# Altium schematic symbol library Centralize.SchLib: 1081 symbols (part 4 of 26)
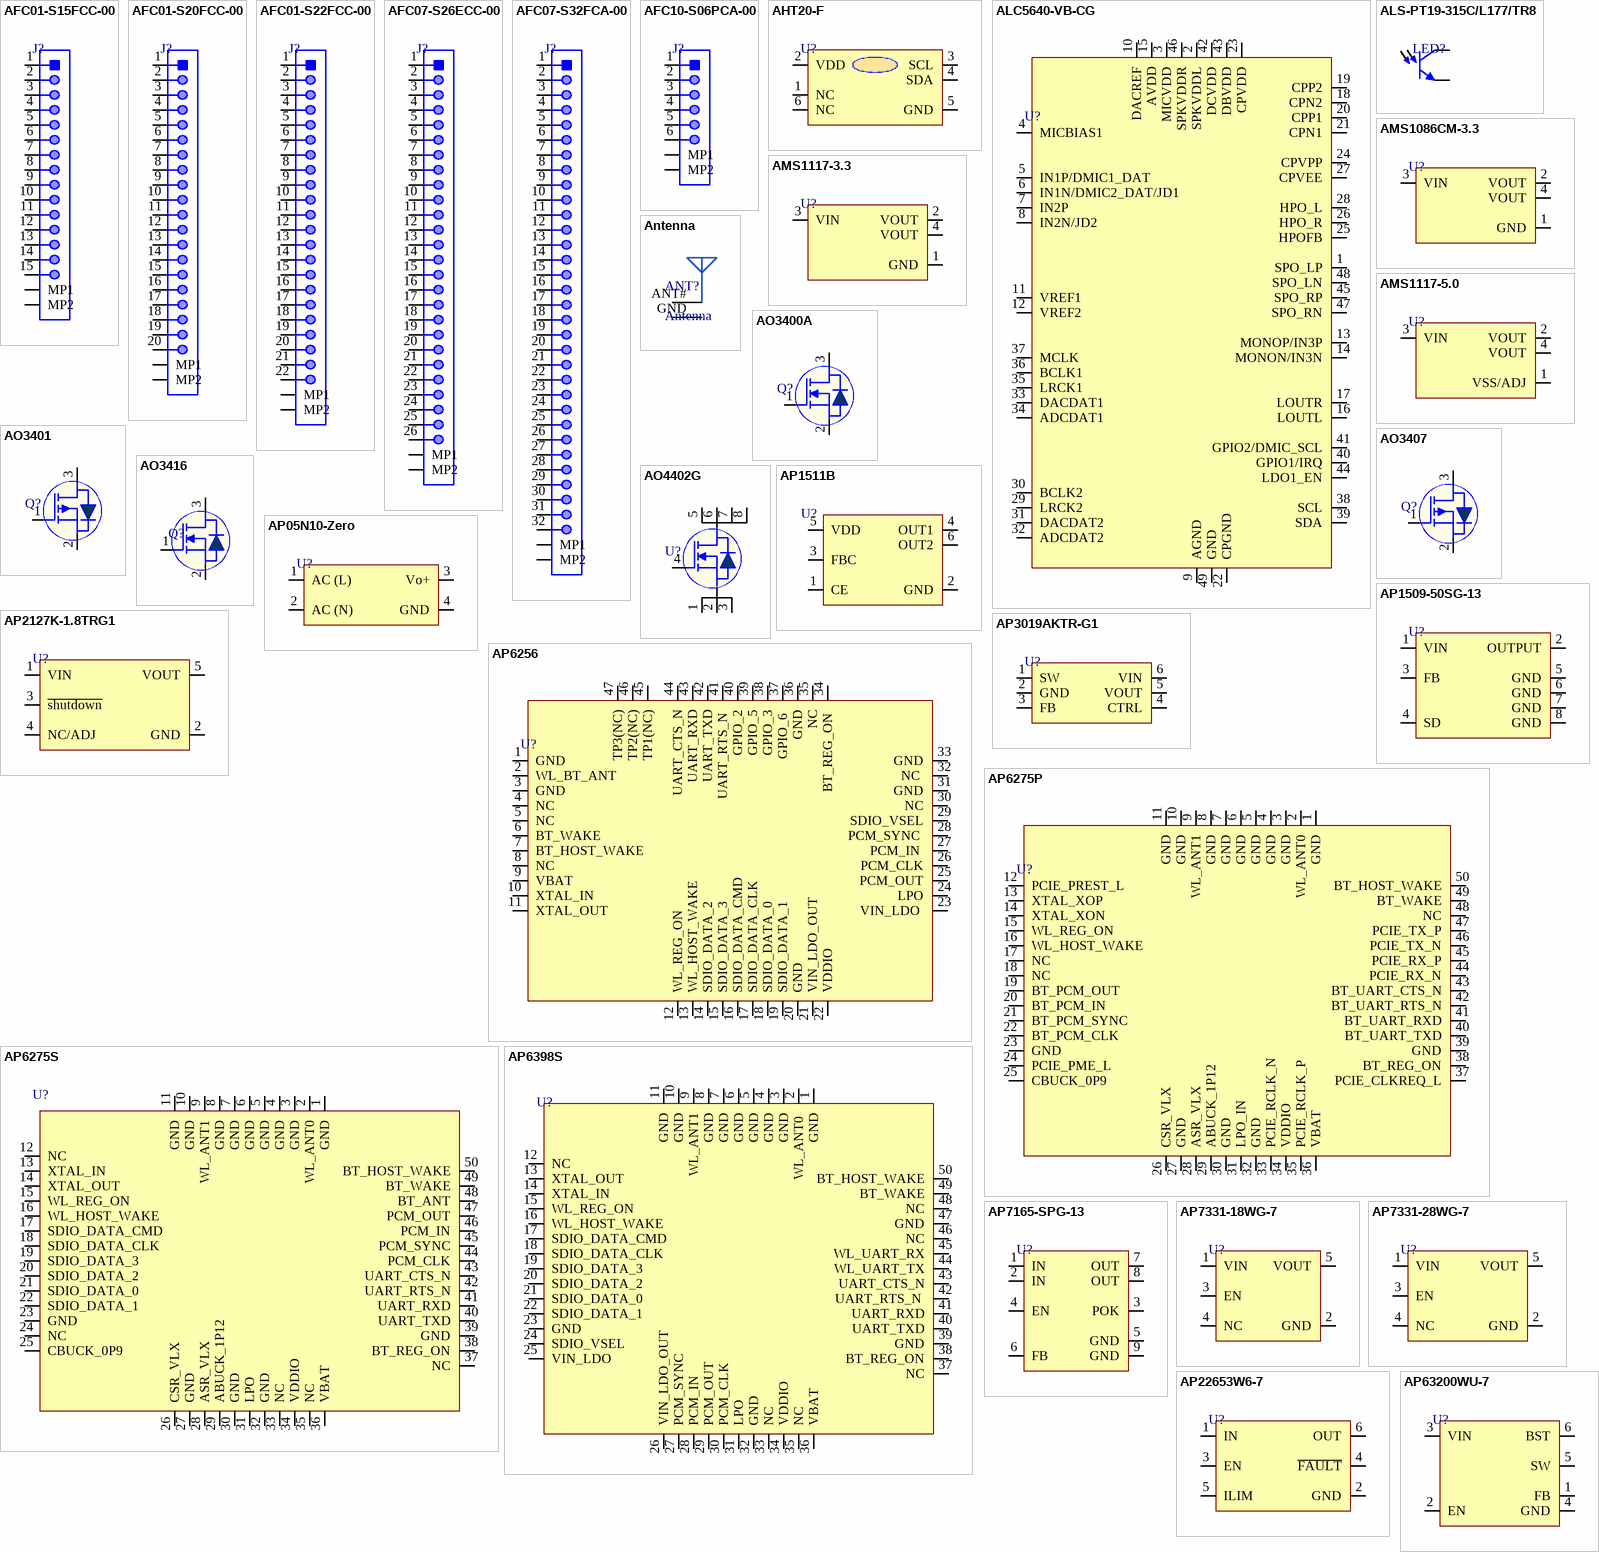
[diagram p50: symbols AFC01-S15FCC-00 to AP63200WU-7]

## AO3401
designator Q?
Trans Mosfet P-ch 30V 4A 3-PIN SOT-23 T/r; Manufacturer: Alpha & Omega Semiconductor; Manufacturer Part Number: AO3401A; Rds On Max: 44mR; Input Capacitance: 1.2nF; Max Power Dissipation: 1.4W; Number of Elements: 1; Supplier 1: Arrow Electronics; RoHS: Yes; Category: MOSFETs; Mount: Surface Mount; Case/Package: TO-236-3; Number of Pins: 3; Min Operating Temperature: -55°C; Max Operating Temperature: 150°C; Packaging: Tape and Reel; Drain to Source Voltage (Vdss): 30V; Continuous Drain Current (ID): 4A; Power Dissipation: 1.4W; Series: -; Radiation Hardening: No; RoHS Compliant: Yes; Lead Free: Lead Free; ComponentLink1URL: https://datasheet.ciiva.com/940/ao3401a-940720.pdf?src-supplier=Digi-Key; ComponentLink1Description: https://datasheet.ciiva.com/940/ao3401a-940720.pdf?src-supplier=Digi-Key; ComponentLink2URL: https://datasheet.ciiva.com/26927/getdatasheetpartid-79048-26927888.pdf?src-supplier=Verical; ComponentLink2Description: https://datasheet.ciiva.com/26927/getdatasheetpartid-79048-26927888.pdf?src-supplier=Verical; Supplier Part Number 1: AO3401A; LCSC Part Number: C181091; Item Type: Mosfet
footprint SOT-23 (TRANS NPN 40V 0.6A SOT23)
pins: 1 G, 2 S, 3 D

## AO3407
designator Q?
30V 4.1A 60mΩ@10V,4.1A 350mW 3V@250uA P Channel SOT-23 MOSFETs ROHS; Manufacturer: Guangdong Hottech; Manufacturer Part Number: AO3407; Item Type: Mosfet; Package: SOT-23; LCSC Part Number: C181093; ComponentLink1Description: LCSC; ComponentLink1URL: https://www.lcsc.com/product-detail/MOSFETs_Guangdong-Hottech-AO3407_C181093.html
footprint SOT-23 (TRANS NPN 40V 0.6A SOT23)
pins: 1 G, 2 S, 3 D

## AO3416
designator Q?
SOT-23 MOSFETs ROHS; Manufacturer Part Number: AO3416; Manufacturer: TECH PUBLIC; Item Type: Mosfet; Package: SOT-23; LCSC Part Number: C5123927; ComponentLink1Description: LCSC; ComponentLink1URL: https://www.lcsc.com/product-detail/MOSFETs_TECH-PUBLIC-AO3416_C5123927.html
footprint Sot-23 (TRANS NPN 40V 0.6A SOT23)
pins: 1 G, 2 S, 3 D

## AO4402G
designator U?
Mosfet N-ch 20V 20A 8SOIC; Manufacturer: Alpha & Omega Semiconductor; Manufacturer Part Number: AO4402G; Supplier: Digi-Key; Supplier Part Number: 785-AO4402GTR-ND; RoHS: No; Category: Transistors; Pricing: 3000=0.47628 (USD); LCSC Part Number: C2931062; Item Type: Mosfet; ComponentLink1Description: LCSC; ComponentLink1URL: https://www.lcsc.com/product-detail/MOSFETs_Alpha-Omega-Semicon-AO4402G_C2931062.html
footprint SOIC-8
pins: 1 S, 2 S, 3 S, 4 G, 5 D, 6 D, 7 D, 8 D

## AP05N10-Zero
designator U?
5V 85VAC~265VAC 2000mA 100V~370V 10W AC/DC-DC 80% Plugin Power Modules ROHS; Manufacturer: HIECUBE; Manufacturer Part Number: AP05N10-Zero; Package: Plugin; LCSC Part Number: C355011; Item Type: Power Module; ComponentLink1Description: LCSC; ComponentLink1URL: https://www.lcsc.com/product-detail/Power-Modules_HIECUBE-AP05N10-Zero_C355011.html
footprint AP05N10-Zero
pins: 1 AC (L), 2 AC (N), 3 Vo+, 4 GND

## AP1509-50SG-13
designator U?
IC REG BUCK 5V 2A 8SOP; Manufacturer: Diodes; Manufacturer Part Number: AP1509-50SG-13; Number of Outputs: 1; Min Input Voltage: 4.5V; Max Supply Voltage: 22V; Efficiency: 83%; Switching Frequency: 150kHz; Synchronous Rectifier: No; Operating Supply Current: 5mA; Output Type: Fixed; Output Configuration: Positive; Frequency: 173kHz; Supplier 1: Rs; RoHS: Yes; Category: Voltage Regulators - Switching; Stock 1: 2230; Pricing 1: 25=1.20600, 125=0.91800, 625=0.81800, 1250=0.63800 (GBP); Mounting Technology: Surface Mount; Case/Package: SOP; Pins: 8; Weight: 0.030018oz; Contact Plating: Tin,Matte; Min Operating Temperature: -20°C; Max Operating Temperature: 85°C; Packaging: Tape and Reel; Output Voltage: 5V; Max Output current: 2A; Package Quantity: 2500; Output Current: 2A; Min Supply Voltage: 4.5V; Nominal Output Voltage: 5V; Min Output Voltage: 5V; Max Output Voltage: 5V; Operating Supply Voltage: 22V; Series: -; Length: 4.95mm; Width: 3.95mm; Height: 1.5mm; Reach SVHC Compliant: Yes; Lead Free: Lead Free; RoHS Compliant: Yes; ComponentLink1URL: https://datasheet.ciiva.com/1161/608784-1161660.pdf?src-supplier=Element14; ComponentLink1Description: https://datasheet.ciiva.com/1161/608784-1161660.pdf?src-supplier=Element14; Supplier Part Number 1: 7512923P; LCSC Part Number: C9984; Item Type: IC
footprint SOP-8
pins: 1 VIN, 2 OUTPUT, 3 FB, 4 SD, 5 GND, 6 GND, 7 GND, 8 GND

## AP1511B
designator U?
SOT-26 Motor Driver ICs ROHS; Manufacturer: UMW(Youtai Semiconductor Co., Ltd.); Manufacturer Part Number: AP1511B; Operating voltage: 2.5-5V; Item Type: IC; Package: SOT-26; ComponentLink1Description: LCSC; ComponentLink1URL: https://lcsc.com/product-detail/Motor-Driver-ICs_UMW-Youtai-Semiconductor-Co-Ltd-AP1511B_C347457.html; LCSC Part Number: C347457
footprint SOT-23-6
pins: 1 CE, 2 GND, 3 FBC, 4 OUT1, 5 VDD, 6 OUT2

## AP2127K-1.8TRG1
designator U?
IC REG LDO 1.8V 0.3A SOT23-5; Manufacturer: Diodes; Manufacturer Part Number: AP2127K-1.8TRG1; Dropout Voltage: 600mV; Number of Outputs: 1; Min Input Voltage: 2.5V; Max Input Voltage: 6V; Output Current: 300mA; Polarity: Positive; Quiescent Current: 90uA; Reference Voltage: 800mV; Accuracy: 2%; Power Supply Rejection Ratio (PSRR): 68dB; Max Output Current: 400mA; Output Type: Fixed; Supplier 1: Digi-Key; RoHS: Yes; Category: Voltage Regulators - Linear; Stock 1: 112006; Pricing 1: 1=0.39000, 10=0.29400, 25=0.26480, 100=0.18290, 250=0.15400, 500=0.12512, 1000=0.09625 (USD); Mount: Surface Mount; Case/Package: SOT-23-5; Number of Pins: 5; Weight: 0.001058oz; Min Operating Temperature: -40°C; Max Operating Temperature: 85°C; Package Quantity: 3000; Packaging: Tape and Reel; Output Voltage: 1.8V; Number of Regulators: 1; Length: 3.1mm; Width: 1.7mm; Height: 1.3mm; Lead Free: Lead Free; RoHS Compliant: Yes; ComponentLink1URL: https://datasheet.ciiva.com/30016/ap2127-30016757.pdf?src-supplier=Avnet; ComponentLink1Description: https://datasheet.ciiva.com/30016/ap2127-30016757.pdf?src-supplier=Avnet; ComponentLink2URL: https://datasheet.ciiva.com/29569/ap2127-29569925.pdf?src-supplier=Digi-Key; ComponentLink2Description: https://datasheet.ciiva.com/29569/ap2127-29569925.pdf?src-supplier=Digi-Key; Supplier Part Number 1: AP2127K-1.8TRG1DICT-ND; Item Type: IC
footprint SOT-23-5
pins: 1 VIN, 2 GND, 3 ~{shutdown}, 4 NC/ADJ, 5 VOUT

## AP3019AKTR-G1
designator U?
IC LED DRVR RGLTR PWM SOT23-6; Manufacturer: Diodes; Manufacturer Part Number: AP3019AKTR-G1; Number of Outputs: 1; Frequency: 1.2MHz; Max Supply Voltage: 16V; Output Current per Channel: 550mA; Max Supply Current: 3.2mA; Output Current: 150mA; Min Input Voltage: 2.5V; Max Output Voltage: 38V; Topology: Boost; Operating Frequency: 1.2 MHz; Supplier 1: Future Electronics; RoHS: Yes; Category: LED Drivers; Stock 1: 6000; Pricing 1: 3000=0.116, 9000=0.113, 15000=0.112, 45000=0.109, 75000=0.106 (USD); Mounting Technology: Surface Mount; Case/Package: SOT-23-6; Pins: 6; Weight: 0.000529oz; Min Operating Temperature: -40°C; Max Operating Temperature: 85°C; Packaging: Tape and Reel; Series: -; Package Quantity: 3000; Number of Channels: 1; Switching Frequency: 1.2MHz; Dimming: PWM; RoHS Compliant: Yes; ComponentLink1URL: https://datasheet.ciiva.com/29602/ap3019a-29602771.pdf?src-supplier=Digi-Key; ComponentLink1Description: https://datasheet.ciiva.com/29602/ap3019a-29602771.pdf?src-supplier=Digi-Key; Supplier Part Number 1: 8048337; LCSC Part Number: C44956; Item Type: IC
footprint SOT-23-6
pins: 1 SW, 2 GND, 3 FB, 4 CTRL, 5 VOUT, 6 VIN

## AP6256
designator U?
802.11ac/a/b/g/n WiFi Combo Sip Module (WiFi 5), 1T1R; Manufacturer: SparkLan; Manufacturer Part Number: AP6256; Item Type: IC; Footprint: Custom; ComponentLink1Description: Sparklan; ComponentLink1URL: https://www.sparklan.com/product/ap6256-broadcom-bcm43435-sip-module/
footprint AP6256_
pins: 1 GND, 2 WL_BT_ANT, 3 GND, 4 NC, 5 NC, 6 BT_WAKE , 7 BT_HOST_WAKE, 8 NC, 9 VBAT, 10 XTAL_IN , 11 XTAL_OUT, 12 WL_REG_ON, 13 WL_HOST_WAKE, 14 SDIO_DATA_2, 15 SDIO_DATA_3, 16 SDIO_DATA_CMD, 17 SDIO_DATA_CLK, 18 SDIO_DATA_0, 19 SDIO_DATA_1, 20 GND, 21 VIN_LDO_OUT, 22 VDDIO, 23 VIN_LDO , 24 LPO, 25 PCM_OUT, 26 PCM_CLK, 27 PCM_IN , 28 PCM_SYNC , 29 SDIO_VSEL, 30 NC, 31 GND, 32 NC , 33 GND, 34 BT_REG_ON , 35 NC, 36 GND, 37 GPIO_6 , 38 GPIO_3, 39 GPIO_5, 40 GPIO_2, 41 UART_RTS_N , 42 UART_TXD, 43 UART_RXD, 44 UART_CTS_N, 45 TP1(NC), 46 TP2(NC), 47 TP3(NC)

## AP6275P
designator U?
-90dBm 16dBm 2.4GHz - WiFi Modules ROHS; Manufacturer: AMPAK Tech; Manufacturer Part Number: AP6275P; Item Type: Module; Package: Custom; LCSC Part Number: C2984107; ComponentLink1Description: LCSC; ComponentLink1URL: https://www.lcsc.com/product-detail/WiFi-Modules_AMPAK-Tech-AP6275P_C2984107.html
footprint AP6275P_
pins: 1 GND, 2 WL_ANT0, 3 GND, 4 GND, 5 GND, 6 GND, 7 GND, 8 GND, 9 WL_ANT1, 10 GND, 11 GND, 12 PCIE_PREST_L, 13 XTAL_XOP, 14 XTAL_XON, 15 WL_REG_ON, 16 WL_HOST_WAKE, 17 NC, 18 NC, 19 BT_PCM_OUT, 20 BT_PCM_IN, 21 BT_PCM_SYNC, 22 BT_PCM_CLK, 23 GND, 24 PCIE_PME_L, 25 CBUCK_0P9, 26 CSR_VLX, 27 GND, 28 ASR_VLX, 29 ABUCK_1P12, 30 GND, 31 LPO_IN, 32 GND, 33 PCIE_RCLK_N, 34 VDDIO, 35 PCIE_RCLK_P, 36 VBAT, 37 PCIE_CLKREQ_L, 38 BT_REG_ON, 39 GND, 40 BT_UART_TXD, 41 BT_UART_RXD, 42 BT_UART_RTS_N, 43 BT_UART_CTS_N, 44 PCIE_RX_N, 45 PCIE_RX_P, 46 PCIE_TX_N, 47 PCIE_TX_P, 48 NC, 49 BT_WAKE, 50 BT_HOST_WAKE

## AP6275S
designator U?
-86dBm 14dBm 2.4GHz - WiFi Modules ROHS; Manufacturer: AMPAK Tech; Manufacturer Part Number: AP6275S; Item Type: Module; Package: Custom; LCSC Part Number: C2918717; ComponentLink1Description: LCSC; ComponentLink1URL: https://www.lcsc.com/product-detail/WiFi-Modules_AMPAK-Tech-AP6275S_C2918717.html
footprint AP6275S_
pins: 1 GND, 2 WL_ANT0, 3 GND, 4 GND, 5 GND, 6 GND, 7 GND, 8 GND, 9 WL_ANT1, 10 GND, 11 GND, 12 NC, 13 XTAL_IN, 14 XTAL_OUT, 15 WL_REG_ON, 16 WL_HOST_WAKE, 17 SDIO_DATA_CMD, 18 SDIO_DATA_CLK, 19 SDIO_DATA_3, 20 SDIO_DATA_2, 21 SDIO_DATA_0, 22 SDIO_DATA_1, 23 GND, 24 NC, 25 CBUCK_0P9, 26 CSR_VLX, 27 GND, 28 ASR_VLX, 29 ABUCK_1P12, 30 GND, 31 LPO, 32 GND, 33 NC, 34 VDDIO, 35 NC, 36 VBAT, 37 NC, 38 BT_REG_ON, 39 GND, 40 UART_TXD, 41 UART_RXD, 42 UART_RTS_N, 43 UART_CTS_N, 44 PCM_CLK, 45 PCM_SYNC, 46 PCM_IN, 47 PCM_OUT, 48 BT_ANT, 49 BT_WAKE, 50 BT_HOST_WAKE

## AP6398S
designator U?
802.11ac/a/b/g/n 2x2 WiFi with Bluetooth5.0 Combo SIP Module; Manufacturer: SparkLAN; Manufacturer Part Number: AP6398S; Item Type: IC; Footprint: Custom; ComponentLink1Description: Verical; ComponentLink1URL: https://www.verical.com/pd/sparklan-communicationslnc.-combo-wireless-module-ap6398s-7079266?utm_medium=datasheet&utm_source=pdf&utm_content=link&utm_term=AP6398S&utm_campaign=datasheet_coverpage_2017
footprint AP6398S_
pins: 1 GND, 2 WL_ANT0 , 3 GND, 4 GND, 5 GND, 6 GND, 7 GND, 8 GND, 9 WL_ANT1, 10 GND, 11 GND, 12 NC, 13 XTAL_OUT, 14 XTAL_IN, 15 WL_REG_ON , 16 WL_HOST_WAKE, 17 SDIO_DATA_CMD, 18 SDIO_DATA_CLK , 19 SDIO_DATA_3, 20 SDIO_DATA_2, 21 SDIO_DATA_0, 22 SDIO_DATA_1, 23 GND, 24 SDIO_VSEL , 25 VIN_LDO, 26 VIN_LDO_OUT, 27 PCM_SYNC , 28 PCM_IN, 29 PCM_OUT, 30 PCM_CLK , 31 LPO , 32 GND, 33 NC, 34 VDDIO , 35 NC, 36 VBAT , 37 NC, 38 BT_REG_ON, 39 GND, 40 UART_TXD, 41 UART_RXD, 42 UART_RTS_N , 43 UART_CTS_N, 44 WL_UART_TX, 45 WL_UART_RX, 46 NC, 47 GND, 48 NC, 49 BT_WAKE, 50 BT_HOST_WAKE

## AP7165-SPG-13
designator U?
IC REG LINEAR POS ADJ 600MA 8SO; Manufacturer: Diodes; Manufacturer Part Number: AP7165-SPG-13; Output Voltage: 5V; Number of Outputs: 1; Min Input Voltage: 2.2V; Max Input Voltage: 5.5V; Max Power Dissipation: 1.9W; Polarity: Positive; Quiescent Current: 170uA; Accuracy: 2.5%; Output Type: Adjustable; Dropout Voltage: 300mV; Input Bias Current: 125uA; Reference Voltage: 800mV; Power Dissipation: 1.9kW; Power Rating: 4W; Power Supply Rejection Ratio (PSRR): 60dB; Supplier 1: Arrow Electronics; RoHS: Yes; Category: Voltage Regulators - Linear; Stock 1: 5000; Pricing 1: 2500=0.28480 (USD); Mount: Surface Mount; Case/Package: SOIC; Number of Pins: 8; Min Operating Temperature: -40°C; Max Operating Temperature: 85°C; Max Output Current: 600mA; Package Quantity: 2500; Output Current: 600mA; Packaging: Tape and Reel; Number of Regulators: 1; Min Current Limit: 600mA; Series: -; Length: 4.95mm; Width: 3.95mm; Height: 1.5mm; Radiation Hardening: No; Lead Free: Lead Free; RoHS Compliant: Yes; ComponentLink1URL: https://datasheet.ciiva.com/26856/getdatasheetpartid-624973-26856354.pdf?src-supplier=Verical; ComponentLink1Description: https://datasheet.ciiva.com/26856/getdatasheetpartid-624973-26856354.pdf?src-supplier=Verical; ComponentLink2URL: https://datasheet.ciiva.com/8240/ap7165-8240044.pdf?src-supplier=Avnet; ComponentLink2Description: https://datasheet.ciiva.com/8240/ap7165-8240044.pdf?src-supplier=Avnet; Supplier Part Number 1: AP7165-SPG-13; LCSC Part Number: C460364; Item Type: IC
footprint 8-SO-EP_
pins: 1 IN, 2 IN, 3 POK, 4 EN, 5 GND, 6 FB, 7 OUT, 8 OUT, 9 GND

## AP7331-18WG-7
designator U?
IC REG LINEAR 1.8V 300MA SOT25; Manufacturer: Diodes; Manufacturer Part Number: AP7331-18WG-7; Number of Outputs: 1; Min Input Voltage: 2V; Max Input Voltage: 6V; Max Power Dissipation: 640mW; Polarity: Positive; Quiescent Current: 55uA; Accuracy: 2%; Output Type: Fixed; Dropout Voltage: 550mV; Min Current Limit: 400mA; Reference Voltage: 400mV; Power Dissipation: 640W; Power Supply Rejection Ratio (PSRR): 65dB; Supplier 1: Digi-Key; RoHS: Yes; Category: Voltage Regulators - Linear; Stock 1: 2879; Pricing 1: 1=0.48000, 10=0.38700, 25=0.35400, 100=0.26360, 250=0.23884, 500=0.19766, 1000=0.14825 (USD); Mount: Surface Mount; Case/Package: SOT-25; Number of Pins: 5; Contact Plating: Tin,Matte; Min Operating Temperature: -40°C; Max Operating Temperature: 85°C; Max Output Current: 300mA; Output Voltage: 1.8V; Packaging: Tape and Reel; Output Current: 300mA; Package Quantity: 3000; Number of Regulators: 1; Series: AP7331; Length: 3.1mm; Width: 1.7mm; Height: 1.3mm; Radiation Hardening: No; Lead Free: Lead Free; REACH SVHC: No SVHC; RoHS Compliant: Yes; ComponentLink1URL: https://datasheet.ciiva.com/4887/ap7331-84206-4887904.pdf?src-supplier=Mouser; ComponentLink1Description: https://datasheet.ciiva.com/4887/ap7331-84206-4887904.pdf?src-supplier=Mouser; ComponentLink2URL: https://datasheet.ciiva.com/26856/getdatasheetpartid-661842-26856377.pdf?src-supplier=Verical; ComponentLink2Description: https://datasheet.ciiva.com/26856/getdatasheetpartid-661842-26856377.pdf?src-supplier=Verical; ComponentLink3URL: https://datasheet.ciiva.com/26908/ap7331-18wg-7-26908418.pdf?src-supplier=IIIC; ComponentLink3Description: https://datasheet.ciiva.com/26908/ap7331-18wg-7-26908418.pdf?src-supplier=IIIC; Supplier Part Number 1: AP7331-18WG-7DICT-ND; LCSC Part Number: C155293; Item Type: IC
footprint SOT-23-5
pins: 1 VIN, 2 GND, 3 EN, 4 NC, 5 VOUT

## AP7331-28WG-7
designator U?
IC REG LINEAR 2.8V 300MA SOT25; Manufacturer: Diodes; Manufacturer Part Number: AP7331-28WG-7; Number of Outputs: 1; Min Input Voltage: 2V; Max Input Voltage: 6V; Max Power Dissipation: 640mW; Polarity: Positive; Quiescent Current: 75uA; Accuracy: 2%; Output Type: Fixed; Dropout Voltage: 300mV; Operating Supply Current: 65uA; Reference Voltage: 400mV; Min Current Limit: 400mA; Power Supply Rejection Ratio (PSRR): 65dB; Supplier 1: Digi-Key; RoHS: Yes; Category: Voltage Regulators - Linear; Stock 1: 8767; Pricing 1: 1=0.52000, 10=0.41800, 25=0.38280, 100=0.28490, 250=0.25820, 500=0.21370, 1000=0.16027 (USD); Mount: Surface Mount; Case/Package: SOT-25; Number of Pins: 5; Min Operating Temperature: -40°C; Max Operating Temperature: 85°C; Max Output Current: 300mA; Output Voltage: 2.8V; Packaging: Tape and Reel; Package Quantity: 3000; Output Current: 300mA; Number of Regulators: 1; Series: -; Length: 3.1mm; Width: 1.7mm; Height: 1.3mm; Radiation Hardening: No; Lead Free: Lead Free; REACH SVHC: No SVHC; RoHS Compliant: Yes; ComponentLink1URL: https://datasheet.ciiva.com/17365/ap7331-17365896.pdf?src-supplier=Avnet+Europe; ComponentLink1Description: https://datasheet.ciiva.com/17365/ap7331-17365896.pdf?src-supplier=Avnet+Europe; Supplier Part Number 1: AP7331-28WG-7DICT-ND; LCSC Part Number: C460376; Item Type: IC
footprint SOT-23-5
pins: 1 VIN, 2 GND, 3 EN, 4 NC, 5 VOUT

## AP22653W6-7
designator U?
LOAD SWITCH,SOT26,T&R,3K; Manufacturer: Diodes; Manufacturer Part Number: AP22653W6-7; Item Type: IC; Supplier 1: Digi-Key; Stock 1: 884; Pricing 1: 1=0.44, 10=0.377, 25=0.352, 100=0.2817, 250=0.26156, 500=0.2213, 1000=0.17101 (USD); Supplier Part Number 1: 31-AP22653W6-7CT-ND; LCSC Part Number: C2158037
footprint SOT-23-6
pins: 1 IN, 2 GND, 3 EN, 4 ~{FAULT}, 5 ILIM, 6 OUT

## AP63200WU-7
designator U?
IC REG BUCK ADJUSTABLE 2A TSOT26; Manufacturer: Diodes; Manufacturer Part Number: AP63200WU-7; Supplier: Future Electronics; Supplier Part Number: 1108623; RoHS: Yes; Category: Voltage Regulators - Switching; Stock: 70; Pricing: 1=0.425, 15=0.385, 75=0.36, 300=0.345, 1500=0.315 (USD); ComponentLink1URL: https://www.diodes.com/assets/Datasheets/AP63200-AP63201-AP63203-AP63205.pdf?src-supplier=Digi-Key; ComponentLink1Description: https://www.diodes.com/assets/Datasheets/AP63200-AP63201-AP63203-AP63205.pdf?src-supplier=Digi-Key; LCSC Part Number: C2071868; Item Type: IC
footprint TSOT-26-6
pins: 1 FB, 2 EN, 3 VIN, 4 GND, 5 SW, 6 BST

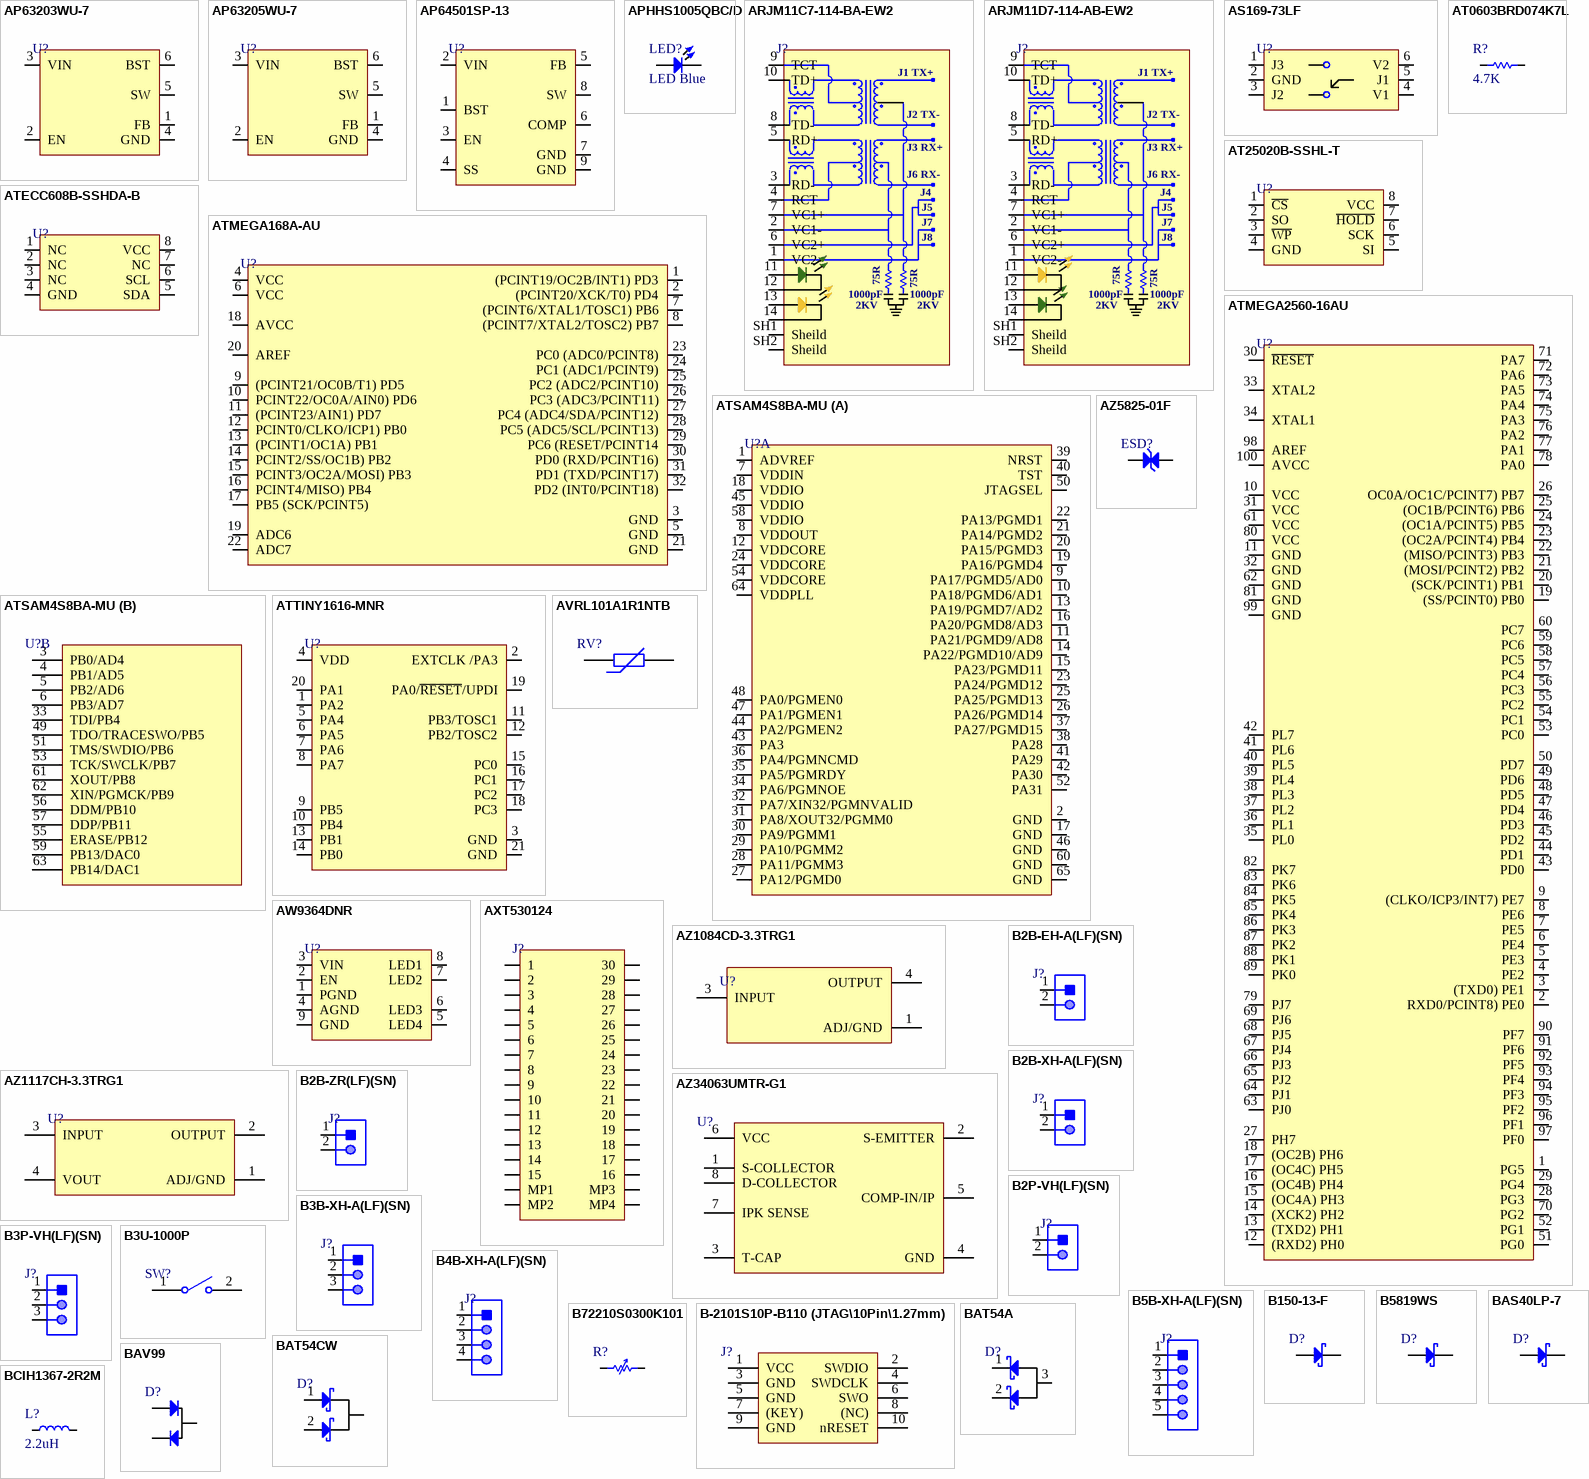
[diagram p4: symbols AP63203WU-7 to BCIH1367-2R2M]

## AP63203WU-7
designator U?
IC REG BUCK 3.3V 2A TSOT26; Manufacturer: Diodes; Manufacturer Part Number: AP63203WU-7; Supplier: Future Electronics; Supplier Part Number: 6109504; RoHS: Yes; Category: Voltage Regulators - Switching; Stock: 3000; Pricing: 3000=0.34, 6000=0.335, 9000=0.33, 12000=0.33, 15000=0.32 (USD); ComponentLink1URL: https://www.diodes.com/assets/Datasheets/AP63200-AP63201-AP63203-AP63205.pdf?src-supplier=Digi-Key; ComponentLink1Description: https://www.diodes.com/assets/Datasheets/AP63200-AP63201-AP63203-AP63205.pdf?src-supplier=Digi-Key; LCSC Part Number: C780769; Item Type: IC
footprint TSOT-23-6
pins: 1 FB, 2 EN, 3 VIN, 4 GND, 5 SW, 6 BST

## AP63205WU-7
designator U?
IC REG BUCK 5V 2A TSOT26; Manufacturer: Diodes; Manufacturer Part Number: AP63205WU-7; Supplier 1: Digi-Key; RoHS: Yes; Category: Voltage Regulators - Switching; Stock 1: 88525; Pricing 1: 1=0.88, 10=0.776, 25=0.7292, 100=0.5952, 250=0.55284, 500=0.4705, 1000=0.3764 (USD); Supplier Part Number 1: AP63205WU-7DICT-ND; LCSC Part Number: C2071056; Item Type: IC
footprint TSOT-23-6
pins: 1 FB, 2 EN, 3 VIN, 4 GND, 5 SW, 6 BST

## AP64501SP-13
designator U?
DCDC CONV HV BUCK SO-8EP; Manufacturer: Diodes; Manufacturer Part Number: AP64501SP-13; Item Type: IC; Supplier 1: Digi-Key; Stock 1: 4418; Pricing 1: 1=2.44, 10=2.191, 25=2.0672, 100=1.7611, 250=1.6536, 500=1.4469, 1000=1.19886 (USD); Supplier Part Number 1: 31-AP64501SP-13CT-ND; LCSC Part Number: C2071517
footprint 8-SO-EP_
pins: 1 BST, 2 VIN, 3 EN, 4 SS, 5 FB, 6 COMP, 7 GND, 8 SW, 9 GND

## APHHS1005QBC/D
designator LED?, comment LED Blue
LED BLUE CLEAR CHIP SMD 0402; Manufacturer: Kingbright; Manufacturer Part Number: APHHS1005QBC/D; Lens Colour: Colorless; Forward Current: 20mA; Forward Voltage: 3.3V; Power Rating: 120mW; Luminous Intensity: 60mcd; Viewing Angle: 120°; Dominant Wavelength: 465nm; Supplier 1: Digi-Key; Stock 1: 57149; Pricing 1: 1=0.58, 10=0.42, 25=0.3432, 100=0.2746, 250=0.23168, 500=0.19734, 1000=0.15444 (USD); Mount: Surface Mount; Case/Package: 0402; Colour: Blue; Case Code (Metric): 1005; Case Code (Imperial): 0402; Min Operating Temperature: -40°C; Max Operating Temperature: 85°C; Package Quantity: 2000; Illumination Colour: Blue; Packaging: Tape and Reel; Lens Style: Clear; Lens Transparency: Clear; Test Current: 20mA; Length: 1mm; Height: 0.6mm; Width: 0.5mm; Lead Free: Lead Free; ComponentLink1URL: http://www.mouser.com/ds/2/216/APHHS1005QBC-D-54846.pdf; ComponentLink1Description: http://www.mouser.com/ds/2/216/APHHS1005QBC-D-54846.pdf; ComponentLink2URL: http://www.kingbrightusa.com/images/catalog/SPEC/APHHS1005QBC-D.pdf; ComponentLink2Description: http://www.kingbrightusa.com/images/catalog/SPEC/APHHS1005QBC-D.pdf; Supplier Part Number 1: 754-1504-1-ND; Item Type: LED
footprint LED-0402
pins: 1, 2

## ARJM11C7-114-BA-EW2
designator J?
Conn RJ-45 F 8 POS 1.27mm Solder RA Thru-Hole 14 Terminal 1 Port Tray; Manufacturer: Abracon; Manufacturer Part Number: ARJM11C7-114-BA-EW2; Connector Type: RJ45; Direction: Up; Number of Ports: 1; Number of Cores per Jack: 4; Shielding: Shielded; Item Type: Ethernet Connector; Supplier 1: Digi-Key; RoHS: Yes; Category: Modular / Ethernet Connectors; Stock 1: 9404; Pricing 1: 1=3.46, 10=3.139, 25=2.9728, 40=2.90375, 100=2.7654, 300=2.4197, 500=2.35058, 1000=2.0049, 2400=1.86663 (USD); Mounting Technology: Through Hole; Color: Green,Yellow; Contact Plating: Gold; Min Operating Temperature: -40°C; Max Operating Temperature: 85°C; Packaging: Tray; Number of Rows: 1; Termination: Solder; Series: ARJM11; RoHS Compliant: Yes; Supplier Part Number 1: 535-14168-ND
footprint ARJM11C7-114-BA-EW2
pins: 1 VC2-, 2 VC1-, 3 RD-, 4 RCT, 5 RD+, 6 VC2+, 7 VC1+, 8 TD-, 9 TCT, 10 TD+, 11 ANODE , 12 CATHODE, 13 ANODE , 14 CATHODE, SH1 Sheild, SH2 Sheild
text: J1 TX+; J2 TX-; J3 RX+; J6 RX-; J4; J5; J7; J8; 75R; 1000pF; 2KV

## ARJM11D7-114-AB-EW2
designator J?
CONN JACK 1PORT 100 BASE-T PCB; Manufacturer: Abracon; Manufacturer Part Number: ARJM11D7-114-AB-EW2; Connector Type: RJ45; Direction: Up; Number of Ports: 1; Number of Cores per Jack: 4; Shielding: Shielded; Item Type: Ethernet Connector; Supplier 1: Mouser; RoHS: Yes; Category: Modular / Ethernet Connectors; Stock 1: 4503; Pricing 1: 1=3.42, 10=3.29, 50=2.88, 100=2.73, 1000=1.98, 10000=1.77 (USD); Mounting Technology: Through Hole; Color: Green,Yellow; Contact Plating: Gold; Min Operating Temperature: -40°C; Max Operating Temperature: 85°C; Packaging: Tray; Number of Rows: 1; Termination: Solder; Series: ARJM11; RoHS Compliant: Yes; ComponentLink1URL: https://abracon.com/Magnetics/ARJM11.pdf?src-supplier=Digi-Key; ComponentLink1Description: https://abracon.com/Magnetics/ARJM11.pdf?src-supplier=Digi-Key; Supplier Part Number 1: 815-RJM11D7114ABEW2
footprint ARJM11D7-114-AB-EW2
pins: 1 VC2-, 2 VC1-, 3 RD-, 4 RCT, 5 RD+, 6 VC2+, 7 VC1+, 8 TD-, 9 TCT, 10 TD+, 11 ANODE , 12 CATHODE, 13 ANODE , 14 CATHODE, SH1 Sheild, SH2 Sheild
text: J1 TX+; J2 TX-; J3 RX+; J6 RX-; J4; J5; J7; J8; 75R; 1000pF; 2KV

## AS169-73LF
designator U?
IC RF SWITCH SPDT 2.5GHZ SOT6; Manufacturer: Skyworks Solutions; Manufacturer Part Number: AS169-73LF; Min Supply Voltage: 3V; Max Supply Voltage: 5V; Impedance: 50R; Insertion Loss: 0.4dB; P1dB: 34dBm; IIP3: 50dBm; Operating Frequency: 300 kHz to 2.5 GHz; Min Frequency: 300kHz; Number of Switches: 1; VSWR: 1.3; Supplier 1: Digi-Key; RoHS: Yes; Category: RF Semiconductors and Devices; Stock 1: 60587; Pricing 1: 1=1.39, 10=1.239, 25=1.1764, 100=0.9664, 250=0.90336, 500=0.7983, 1000=0.63024 (USD); Case/Package: SOT-6; Pins: 6; Min Operating Temperature: -40°C; Max Operating Temperature: 85°C; Frequency: 2.5GHz; Series: -; Packaging: Cut Tape; Package Quantity: 3000; Clock Frequency: 2.5GHz; Termination: SMD/SMT; Throw Configuration: SPDT; Test Frequency: 2.5GHz; Radiation Hardening: No; RoHS Compliant: Yes; Reach SVHC Compliant: Unknown; ComponentLink1URL: https://datasheet.ciiva.com/12080/200105e-32376-12080179.pdf?src-supplier=Mouser; ComponentLink1Description: https://datasheet.ciiva.com/12080/200105e-32376-12080179.pdf?src-supplier=Mouser; ComponentLink2URL: https://datasheet.ciiva.com/1167/200105e-1167200.pdf?src-supplier=Farnell; ComponentLink2Description: https://datasheet.ciiva.com/1167/200105e-1167200.pdf?src-supplier=Farnell; ComponentLink3URL: https://datasheet.ciiva.com/15100/getdatasheetpartid-651219-15100445.pdf?src-supplier=Verical; ComponentLink3Description: https://datasheet.ciiva.com/15100/getdatasheetpartid-651219-15100445.pdf?src-supplier=Verical; Supplier Part Number 1: 863-1002-1-ND; LCSC Part Number: C133314; Item Type: IC
footprint SOT-23-6
pins: 1 J3, 2 GND, 3 J2, 4 V1, 5 J1, 6 V2

## AT0603BRD074K7L
designator R?, comment 4.7K
RES SMD 4.7K OHM 0.1% 1/10W 0603; Manufacturer: Yageo; Manufacturer Part Number: AT0603BRD074K7L; Resistance: 4.7kR; Max Power Dissipation: 100mW; Temperature Coefficient: 25ppm/°C; Item Type: Resistor; Supplier 1: Digi-Key; Stock 1: 7928; Pricing 1: 1=0.56, 10=0.431, 100=0.181, 1000=0.09986, 2500=0.09362 (USD); Case/Package: 0603; Case Code (Metric): 1608; Case Code (Imperial): 0603; Min Operating Temperature: -55°C; Max Operating Temperature: 155°C; Packaging: Tape and Reel; Composition: Thin Film; Number of Terminations: 2; Tolerance: 0.1%; Features: Anti-Sulfur,Automotive AEC-Q200,Moisture Resistant; Length: 0.063inch; Height: 0.022inch; Width: 0.032inch; Supplier Part Number 1: YAG2113CT-ND; LCSC Part Number: C855887
footprint Res-0603
footprint Res-0603
pins: 1, 2

## AT25020B-SSHL-T
designator U?
IC EEPROM 2KBIT SPI 20MHZ 8SOIC; Manufacturer: Microchip; Manufacturer Part Number: AT25020B-SSHL-T; Supplier: Arrow Electronics; Supplier Part Number: AT25020B-SSHL-T; RoHS: Yes; Stock: 11005; Pricing: 1=0.3322, 10=0.329, 25=0.3023, 100=0.2992, 250=0.2962, 500=0.2959, 1000=0.2955, 3000=0.2953, 6000=0.2949 (USD); ComponentLink1URL: https://datasheet.ciiva.com/15212/getdatasheetpartid-362088-15212907.pdf?src-supplier=Verical; ComponentLink1Description: https://datasheet.ciiva.com/15212/getdatasheetpartid-362088-15212907.pdf?src-supplier=Verical; ComponentLink2URL: https://datasheet.ciiva.com/6614/at25010-20-40b-6614732.pdf?src-supplier=Digi-Key; ComponentLink2Description: https://datasheet.ciiva.com/6614/at25010-20-40b-6614732.pdf?src-supplier=Digi-Key; ComponentLink3URL: https://datasheet.ciiva.com/6614/at25010-20-40b-6614733.pdf?src-supplier=Digi-Key; ComponentLink3Description: https://datasheet.ciiva.com/6614/at25010-20-40b-6614733.pdf?src-supplier=Digi-Key; LCSC Part Number: C2061419; Item Type: IC
footprint SOP-8
pins: 1 ~{CS}, 2 SO, 3 ~{WP}, 4 GND, 5 SI, 6 SCK, 7 ~{HOLD}, 8 VCC

## ATECC608B-SSHDA-B
designator U?
IC AUTHENTICATION CHIP 8SOIC; Manufacturer: Microchip; Manufacturer Part Number: ATECC608B-SSHDA-B; Supplier 1: Rs; RoHS: Yes; Category: Interface ICs; Stock 1: 590; Pricing 1: 20=0.758, 50=0.704, 80=0.691 (GBP); Supplier Part Number 1: 2368834P; ComponentLink1Description: LCSC; ComponentLink1URL: https://www.lcsc.com/product-detail/Security-Verification-Encryption-ICs_Microchip-Tech-ATECC608B-SSHDA-B_C5444784.html; LCSC Part Number: C5444784; Item Type: IC
footprint SOIC-8
pins: 1 NC, 2 NC, 3 NC, 4 GND, 5 SDA, 6 SCL, 7 NC, 8 VCC

## ATMEGA168A-AU
designator U?
IC MCU 8BIT 16KB FLASH 32TQFP; Manufacturer: Microchip Tech; Manufacturer Part Number: ATMEGA168A-AU; Package: TQFP-32(7x7); LCSC Part Number: C1522091; Item Type: IC; ComponentLink1URL: https://www.lcsc.com/product-detail/Microcontroller-Units-MCUs-MPUs-SOCs_Microchip-Tech-ATMEGA168A-AU_C1522091.html; ComponentLink1Description: LCSC
footprint 32 TQFP (7x7)
pins: 1 (PCINT19/OC2B/INT1) PD3, 2 (PCINT20/XCK/T0) PD4, 3 GND, 4 VCC, 5 GND, 6 VCC, 7 (PCINT6/XTAL1/TOSC1) PB6, 8 (PCINT7/XTAL2/TOSC2) PB7, 9 (PCINT21/OC0B/T1) PD5, 10 PCINT22/OC0A/AIN0) PD6, 11 (PCINT23/AIN1) PD7, 12 PCINT0/CLKO/ICP1) PB0, 13 (PCINT1/OC1A) PB1, 14 PCINT2/SS/OC1B) PB2, 15 PCINT3/OC2A/MOSI) PB3, 16 PCINT4/MISO) PB4, 17 PB5 (SCK/PCINT5), 18 AVCC, 19 ADC6, 20 AREF, 21 GND, 22 ADC7, 23 PC0 (ADC0/PCINT8), 24 PC1 (ADC1/PCINT9), 25 PC2 (ADC2/PCINT10), 26 PC3 (ADC3/PCINT11), 27 PC4 (ADC4/SDA/PCINT12), 28 PC5 (ADC5/SCL/PCINT13), 29 PC6 (RESET/PCINT14, 30 PD0 (RXD/PCINT16), 31 PD1 (TXD/PCINT17), 32 PD2 (INT0/PCINT18)

## ATMEGA2560-16AU
designator U?
IC MCU 8BIT 256KB FLASH 100TQFP; Manufacturer: Microchip; Manufacturer Part Number: ATMEGA2560-16AU; Number of Terminals/Pins: 100; Package Body Material: Plastic; Core Architecture: AVR; Frequency: 16MHz; Interface: I2C,SPI,UART,USART,EBI/EMI,2-Wire; Number of I/Os: 86; Oscillator Type: Internal; Data Bus Width: 8b; Peripherals: PWM,Brown-out Detect/Reset,POR,WDT; Min Supply Voltage: 4.5V; Max Supply Voltage: 5.5V; Number of PWM Channels: 12; Operating Supply Voltage: 5V; RAM Size: 8KB; Number of Timers/Counters: 6; Number of ADC Channels: 16; Number of SPI Channels: 1; Watchdog Timer: Yes; Access Time: 16us; Time @ Peak Reflow Temperature-Max (s): 40s; Supplier 1: Avnet; RoHS: Yes; Category: Uncategorized; Stock 1: 4; Pricing 1: 1=12.70000 (USD); Mount: Surface Mount; Case/Package: A; Number of Pins: 100; Package Code: TFQFP; Package Shape: Square; Terminal Finish: Tin; Min Operating Temperature: -40°C; Max Operating Temperature: 85°C; Series: AVR® ATmega; Package Quantity: 90; Packaging: Tray; Memory Size: 256KB; Memory Type: FLASH; Density: 256KB; Number of Programmable I/O: 86; Max Frequency: 16MHz; Number of I2C Channels: 1; Termination: SMD/SMT; Terminal Form: Gull Wing; JESD-30 Code: S-PQFP-G100; Surface Mount: Yes; Terminal Position: QUAD; Number of I/O Lines: 86; Moisture Sensitivity Level: 3; Technology: CMOS; Peak Reflow Temperature (Cel): 260°C; Length: 14.1mm; Width: 14.1mm; Height: 1.05mm; Radiation Hardening: No; Reach SVHC Compliant: Yes; Lead Free: Lead Free; RoHS Compliant: Yes; Temperature Grade: INDUSTRIAL; ComponentLink1URL: https://datasheet.ciiva.com/22651/1698622-22651116.pdf?src-supplier=Farnell; ComponentLink1Description: https://datasheet.ciiva.com/22651/1698622-22651116.pdf?src-supplier=Farnell; ComponentLink2URL: https://datasheet.ciiva.com/15122/getdatasheetpartid-134542-15122545.pdf?src-supplier=Verical; ComponentLink2Description: https://datasheet.ciiva.com/15122/getdatasheetpartid-134542-15122545.pdf?src-supplier=Verical; ComponentLink3URL: https://datasheet.ciiva.com/29119/154804-da-01-en-atmega2560-16au-tqfp-100-29119580.pdf?src-supplier=Conrad; ComponentLink3Description: https://datasheet.ciiva.com/29119/154804-da-01-en-atmega2560-16au-tqfp-100-29119580.pdf?src-supplier=Conrad; ComponentLink4URL: https://datasheet.ciiva.com/6640/atmel-2549-8-bit-avr-microcontroller-atmega640-1280-1281-2560-2561-summary-6640293.pdf?src-supplier=Digi-Key; ComponentLink4Description: https://datasheet.ciiva.com/6640/atmel-2549-8-bit-avr-microcontroller-atmega640-1280-1281-2560-2561-summary-6640293.pdf?src-supplier=Digi-Key; ComponentLink5URL: https://datasheet.ciiva.com/1162/33246-1162139.pdf?src-supplier=Farnell; ComponentLink5Description: https://datasheet.ciiva.com/1162/33246-1162139.pdf?src-supplier=Farnell; ComponentLink6URL: https://datasheet.ciiva.com/1157/1817551-1157521.pdf?src-supplier=Element14; ComponentLink6Description: https://datasheet.ciiva.com/1157/1817551-1157521.pdf?src-supplier=Element14; ComponentLink7URL: https://datasheet.ciiva.com/16936/70123980-16936268.pdf?src-supplier=Allied+Electronics; ComponentLink7Description: https://datasheet.ciiva.com/16936/70123980-16936268.pdf?src-supplier=Allied+Electronics; Supplier Part Number 1: 68T2776; LCSC Part Number: C22460; Item Type: IC
footprint TQFP-100(14x14)
pins: 1 PG5, 2 RXD0/PCINT8) PE0, 3 (TXD0) PE1, 4 PE2, 5 PE3, 6 PE4, 7 PE5, 8 PE6, 9 (CLKO/ICP3/INT7) PE7, 10 VCC, 11 GND, 12 (RXD2) PH0, 13 (TXD2) PH1, 14 (XCK2) PH2, 15 (OC4A) PH3, 16 (OC4B) PH4, 17 (OC4C) PH5, 18 (OC2B) PH6, 19 (SS/PCINT0) PB0, 20 (SCK/PCINT1) PB1, 21 (MOSI/PCINT2) PB2, 22 (MISO/PCINT3) PB3, 23 (OC2A/PCINT4) PB4, 24 (OC1A/PCINT5) PB5, 25 (OC1B/PCINT6) PB6, 26 OC0A/OC1C/PCINT7) PB7, 27 PH7, 28 PG3, 29 PG4, 30 ~{RESET}, 31 VCC, 32 GND, 33 XTAL2, 34 XTAL1, 35 PL0, 36 PL1, 37 PL2, 38 PL3, 39 PL4, 40 PL5, 41 PL6, 42 PL7, 43 PD0, 44 PD1, 45 PD2, 46 PD3, 47 PD4, 48 PD5, 49 PD6, 50 PD7, 51 PG0, 52 PG1, 53 PC0, 54 PC1, 55 PC2, 56 PC3, 57 PC4, 58 PC5, 59 PC6, 60 PC7, 61 VCC, 62 GND, 63 PJ0, 64 PJ1, 65 PJ2, 66 PJ3, 67 PJ4, 68 PJ5, 69 PJ6, 70 PG2, 71 PA7, 72 PA6, 73 PA5, 74 PA4, 75 PA3, 76 PA2, 77 PA1, 78 PA0, 79 PJ7, 80 VCC, 81 GND, 82 PK7, 83 PK6, 84 PK5, 85 PK4, 86 PK3, 87 PK2, 88 PK1, 89 PK0, 90 PF7, 91 PF6, 92 PF5, 93 PF4, 94 PF3, 95 PF2, 96 PF1, 97 PF0, 98 AREF, 99 GND, 100 AVCC

## ATSAM4S8BA-MU
designator U?
IC MCU 32BIT 512KB FLASH 64QFN; Manufacturer: Microchip; Manufacturer Part Number: ATSAM4S8BA-MU; Interface: I2C,SPI,USB,IrDA,UART,USART; Peripherals: Brown-out Detect/Reset,POR,PWM,WDT,DMA; Core Architecture: ARM; Frequency: 120MHz; Oscillator Type: Internal; Number of I/Os: 47; Supplier 1: Digi-Key; RoHS: Yes; Category: Microcontrollers; Pricing 1: 1=6.23000, 25=5.66960, 100=5.13000 (USD); Case/Package: QFN; Min Operating Temperature: -40°C; Max Operating Temperature: 85°C; Memory Type: FLASH; Packaging: Tray; Memory Size: 512KB; RoHS Compliant: Yes; ComponentLink1URL: http://www.microchip.com/mymicrochip/filehandler.aspx?ddocname=en590343&src-supplier=Digi-Key; ComponentLink1Description: http://www.microchip.com/mymicrochip/filehandler.aspx?ddocname=en590343&src-supplier=Digi-Key; Supplier Part Number 1: ATSAM4S8BA-MU-ND; LCSC Part Number: C1337875; Item Type: IC
footprint QFN-64-EP(9x9)
part A pins: 1 ADVREF, 2 GND, 7 VDDIN, 8 VDDOUT, 9 PA17/PGMD5/AD0, 10 PA18/PGMD6/AD1, 11 PA21/PGMD9/AD8, 12 VDDCORE, 13 PA19/PGMD7/AD2, 14 PA22/PGMD10/AD9, 15 PA23/PGMD11, 16 PA20/PGMD8/AD3, 17 GND, 18 VDDIO, 19 PA16/PGMD4, 20 PA15/PGMD3, 21 PA14/PGMD2, 22 PA13/PGMD1, 23 PA24/PGMD12, 24 VDDCORE, 25 PA25/PGMD13, 26 PA26/PGMD14, 27 PA12/PGMD0, 28 PA11/PGMM3, 29 PA10/PGMM2, 30 PA9/PGMM1, 31 PA8/XOUT32/PGMM0, 32 PA7/XIN32/PGMNVALID, 34 PA6/PGMNOE, 35 PA5/PGMRDY, 36 PA4/PGMNCMD, 37 PA27/PGMD15, 38 PA28, 39 NRST, 40 TST, 41 PA29, 42 PA30, 43 PA3, 44 PA2/PGMEN2, 45 VDDIO, 46 GND, 47 PA1/PGMEN1, 48 PA0/PGMEN0, 50 JTAGSEL, 52 PA31, 54 VDDCORE, 58 VDDIO, 60 GND, 64 VDDPLL, 65 GND
part B pins: 3 PB0/AD4, 4 PB1/AD5, 5 PB2/AD6, 6 PB3/AD7, 33 TDI/PB4, 49 TDO/TRACESWO/PB5, 51 TMS/SWDIO/PB6, 53 TCK/SWCLK/PB7, 55 ERASE/PB12, 56 DDM/PB10, 57 DDP/PB11, 59 PB13/DAC0, 61 XOUT/PB8, 62 XIN/PGMCK/PB9, 63 PB14/DAC1

## ATTINY1616-MNR
designator U?
IC MCU 8BIT 16KB FLASH 20VQFN; Manufacturer: Microchip Tech; Manufacturer Part Number: ATTINY1616-MNR; Package: QFN-20-EP(3x3); LCSC Part Number: C507118; Item Type: IC; ComponentLink1URL: https://www.lcsc.com/product-detail/Microcontroller-Units-MCUs-MPUs-SOCs_Microchip-Tech-ATTINY1616-MNR_C507118.html; ComponentLink1Description: LCSC
footprint 20-VQFN (3x3)
pins: 1 PA2, 2 EXTCLK /PA3, 3 GND, 4 VDD, 5 PA4, 6 PA5, 7 PA6, 8 PA7, 9 PB5, 10 PB4, 11 PB3/TOSC1, 12 PB2/TOSC2, 13 PB1, 14 PB0, 15 PC0, 16 PC1, 17 PC2, 18 PC3, 19 PA0/~{RESET}/UPDI, 20 PA1, 21 GND

## AVRL101A1R1NTB
designator RV?
Var MLV 10VDC 39V 0402 SMD Automotive T/R; Manufacturer: TDK; Manufacturer Part Number: AVRL101A1R1NTB; Capacitance: 1.1pF; Voltage Rating (DC): 10V; Number of Circuits: 1; ESD Protection: Yes; Voltage Rating (AC): 90V; Item Type: Varistor; Supplier 1: Arrow Electronics; RoHS: Yes; Category: Varistors; Stock 1: 19173; Pricing 1: 1=0.32970, 10=0.24050, 25=0.22400, 100=0.10950, 250=0.10820, 500=0.09010, 1000=0.06020, 3000=0.04830, 6000=0.04780, 15000=0.03940 (USD); Mount: Surface Mount; Case/Package: 0402; Case Code (Imperial): 0402; Case Code (Metric): 1005; Material: Zinc; Contact Plating: Tin; Size Code: 402; Min Operating Temperature: -40°C; Max Operating Temperature: 85°C; Packaging: Tape and Reel; Package Quantity: 10000; Max Voltage Rating (DC): 10V; Termination: SMD/SMT; Varistor Voltage: 39V; Series: AVRL; Length: 1mm; Width: 0.5mm; Depth: 0.5mm; Lead Free: Lead Free; RoHS Compliant: Yes; ComponentLink1URL: https://datasheet.ciiva.com/3024/e9c11-avr-3024276.pdf?src-supplier=Avnet; ComponentLink1Description: https://datasheet.ciiva.com/3024/e9c11-avr-3024276.pdf?src-supplier=Avnet; ComponentLink2URL: https://datasheet.ciiva.com/365/e9c11-avr-365018.pdf?src-supplier=Digi-Key; ComponentLink2Description: https://datasheet.ciiva.com/365/e9c11-avr-365018.pdf?src-supplier=Digi-Key; ComponentLink3URL: https://datasheet.ciiva.com/365/e9c11-avr-365019.pdf?src-supplier=Digi-Key; ComponentLink3Description: https://datasheet.ciiva.com/365/e9c11-avr-365019.pdf?src-supplier=Digi-Key; ComponentLink4URL: https://datasheet.ciiva.com/365/e9c11-avr-365020.pdf?src-supplier=Digi-Key; ComponentLink4Description: https://datasheet.ciiva.com/365/e9c11-avr-365020.pdf?src-supplier=Digi-Key; Supplier Part Number 1: AVRL101A1R1NTB; LCSC Part Number: C92016
footprint Res-0402
pins: 1, 2

## AW9364DNR
designator U?
-40℃~+85℃ DFN-8-EP(2x2) LED Drivers ROHS; Manufacturer: AWINIC; Manufacturer Part Number: AW9364DNR; Item Type: IC; Package: DFN-8-EP(2x2); LCSC Part Number: C401007; ComponentLink1Description: LCSC; ComponentLink1URL: https://www.lcsc.com/product-detail/LED-Drivers_AWINIC-Shanghai-Awinic-Tech-AW9364DNR_C401007.html
footprint DFN-8-EP(2x2)
pins: 1 PGND, 2 EN, 3 VIN, 4 AGND, 5 LED4, 6 LED3, 7 LED2, 8 LED1, 9 GND

## AXT530124
designator J?
CONN SOCKET 30POS SMD GOLD; Manufacturer: Panasonic; Manufacturer Part Number: AXT530124; Number of Positions: 30; Contact Resistance: 90mR; Max Current Rating: 5A; Max Voltage Rating (DC): 60V; Current Rating: 300mA; Insulation Resistance: 1GR; Pitch: 0.4mm; Mated Stacking Heights: 1mm; Item Type: Connector; Supplier 1: Digi-Key; RoHS: Yes; Category: Board to Board Connectors; Stock 1: 14790; Pricing 1: 1=1.43000, 10=1.20900, 25=1.15960, 50=1.13500, 100=1.08570, 250=0.98700, 500=0.88830, 1000=0.78960 (USD); Mount: Surface Mount; Contact Plating: Gold; Contact Material: Copper Alloy; Housing Material: Polymer; Min Operating Temperature: -55°C; Max Operating Temperature: 85°C; Package Quantity: 1; Number of Rows: 2; Packaging: Tape and Reel; Connector Type: Socket; Voltage Rating: 60V; Termination: Solder; Number of Contacts: 30; Max Voltage Rating (AC): 60V; Orientation: Straight; Series: F4S; Length: 8.5mm; Depth: 3mm; Radiation Hardening: No; Lead Free: Lead Free; RoHS Compliant: Yes; ComponentLink1URL: http://components.arrow.com/part/dataview/0323_03238060?src-supplier=Arrow+Europe; ComponentLink1Description: http://components.arrow.com/part/dataview/0323_03238060?src-supplier=Arrow+Europe; ComponentLink2URL: http://www.mouser.com/ds/2/315/f4s-catalog-1075850.pdf?src-supplier=Mouser; ComponentLink2Description: http://www.mouser.com/ds/2/315/f4s-catalog-1075850.pdf?src-supplier=Mouser; ComponentLink3URL: http://components.arrow.com/part/dataview/46992153S8061598N2972?src-supplier=Arrow+Electronics; ComponentLink3Description: http://components.arrow.com/part/dataview/46992153S8061598N2972?src-supplier=Arrow+Electronics; ComponentLink4URL: http://panasonic-denko.co.jp/ac/e_download/control/connector/base-fpc/catalog/con_eng_f4s.pdf?via=ok&src-supplier=Avnet; ComponentLink4Description: http://panasonic-denko.co.jp/ac/e_download/control/connector/base-fpc/catalog/con_eng_f4s.pdf?via=ok&src-supplier=Avnet; ComponentLink5URL: http://www3.panasonic.biz/ac/e_download/control/connector/base-fpc/catalog/con_eng_f4s.pdf?src-supplier=Digi-Key; ComponentLink5Description: http://www3.panasonic.biz/ac/e_download/control/connector/base-fpc/catalog/con_eng_f4s.pdf?src-supplier=Digi-Key; ComponentLink6URL: http://panasonic-denko.co.jp/ac/e_download/control/connector/base-fpc/catalog/con_eng_f4s.pdf?via=ok&src-supplier=Avnet+Asia; ComponentLink6Description: http://panasonic-denko.co.jp/ac/e_download/control/connector/base-fpc/catalog/con_eng_f4s.pdf?via=ok&src-supplier=Avnet+Asia; ComponentLink7URL: https://www.verical.com/server-webapp/html/getDatasheet?partID=80226&src-supplier=Verical; ComponentLink7Description: https://www.verical.com/server-webapp/html/getDatasheet?partID=80226&src-supplier=Verical; ComponentLink8URL: http://www.onlinecomponents.com/datasheet/axt530124.aspx?p=10552986&src-supplier=Onlinecomponents.com; ComponentLink8Description: http://www.onlinecomponents.com/datasheet/axt530124.aspx?p=10552986&src-supplier=Onlinecomponents.com; Supplier Part Number 1: 255-2410-1-ND; LCSC Part Number: C2924271
footprint AXT530124_
pins: 1, 2, 3, 4, 5, 6, 7, 8, 9, 10, 11, 12, 13, 14, 15, 16, 17, 18, 19, 20, 21, 22, 23, 24, 25, 26, 27, 28, 29, 30, MP1, MP2, MP3, MP4

## AZ1084CD-3.3TRG1
designator U?
IC REG LINEAR 3.3V 5A TO252-2; Manufacturer: Diodes; Manufacturer Part Number: AZ1084CD-3.3TRG1; Number of Outputs: 1; Max Input Voltage: 12V; Dropout Voltage: 1.35V; Min Current Limit: 5.5A; Polarity: Positive; Quiescent Current: 5mA; Reference Voltage: 1.262V; Power Supply Rejection Ratio (PSRR): 72dB; Output Type: Fixed; Supplier 1: RSComponents; RoHS: Yes; Category: Voltage Regulators - Linear; Stock 1: 1000; Pricing 1: 100=0.23900, 200=0.22800, 400=0.21600, 800=0.20500 (GBP); Mount: Surface Mount; Case/Package: TO-252-3; Number of Pins: 3; Min Operating Temperature: 0°C; Max Operating Temperature: 125°C; Max Output Current: 5A; Output Voltage: 3.3V; Package Quantity: 2500; Packaging: Tape and Reel; Output Current: 5A; Number of Regulators: 1; Length: 6.73mm; Width: 6.22mm; Height: 2.38mm; RoHS Compliant: Yes; ComponentLink1URL: https://datasheet.ciiva.com/29570/az1084c-29570097.pdf?src-supplier=Digi-Key; ComponentLink1Description: https://datasheet.ciiva.com/29570/az1084c-29570097.pdf?src-supplier=Digi-Key; Supplier Part Number 1: 8287570P; LCSC Part Number: C151391; Item Type: IC
footprint TO-252AA
pins: 1 ADJ/GND, 3 INPUT, 4 OUTPUT

## AZ1117CH-3.3TRG1
designator U?
15V 1.3V @ 800mA Fixed 3.3V SOT-223 Linear Voltage Regulators (LDO) ROHS; Manufacturer: Diodes Incorporated; Manufacturer Part Number: AZ1117CH-3.3TRG1; Item Type: IC; Package: SOT-223; LCSC Part Number: C92102; ComponentLink1Description: LCSC; ComponentLink1URL: https://lcsc.com/product-detail/Linear-Voltage-Regulators-LDO_Diodes-Incorporated-AZ1117CH-3-3TRG1_C92102.html
footprint SOT- 223
pins: 1 ADJ/GND, 2 OUTPUT, 3 INPUT, 4 VOUT

## AZ5825-01F
designator ESD?
DFN1006P ESD Protection Devices ROHS; Manufacturer: TECH PUBLIC; Manufacturer Part Number: AZ5825-01F; Item Type: Diode; ComponentLink1Description: LCSC; ComponentLink1URL: https://lcsc.com/product-detail/ESD-Protection-Devices_TECH-PUBLIC-AZ5825-01F_C2905641.html; Footprint: FN1006P; LCSC Part Number: C2905641
footprint DFN1006-2L_
pins: 1 A, 2 A

## AZ34063UMTR-G1
designator U?
IC REG BUCK BST ADJ 1.5A 8SOIC; Manufacturer: Diodes; Manufacturer Part Number: AZ34063UMTR-G1; Number of Outputs: 1; Output Voltage: 36V; Min Input Voltage: 3V; Min Output Voltage: 1.25V; Switching Frequency: 180kHz; Synchronous Rectifier: No; Operating Supply Current: 4mA; Output Type: Adjustable; Supplier 1: Digi-Key; RoHS: Yes; Category: Power Supply Modules; Stock 1: 13716; Pricing 1: 1=0.51000, 10=0.41500, 25=0.37920, 100=0.28220, 250=0.25576, 500=0.21166, 1000=0.15875 (USD); Mount: Surface Mount; Case/Package: SOIC; Number of Pins: 8; Weight: 0.00261oz; Min Operating Temperature: -40°C; Max Operating Temperature: 85°C; Packaging: Tape and Reel; Max Output Current: 1.5A; Max Input Voltage: 36V; Package Quantity: 4000; Max Output Voltage: 36V; Output Current: 1.5A; Min Supply Voltage: 3V; Operating Supply Voltage: 36V; Length: 5.1mm; Width: 4mm; Height: 1.45mm; Lead Free: Lead Free; RoHS Compliant: Yes; ComponentLink1URL: https://datasheet.ciiva.com/29734/az34063u-29734577.pdf?src-supplier=Digi-Key; ComponentLink1Description: https://datasheet.ciiva.com/29734/az34063u-29734577.pdf?src-supplier=Digi-Key; ComponentLink2URL: https://datasheet.ciiva.com/29734/az34063u-29734583.pdf?src-supplier=Digi-Key; ComponentLink2Description: https://datasheet.ciiva.com/29734/az34063u-29734583.pdf?src-supplier=Digi-Key; ComponentLink3URL: https://datasheet.ciiva.com/29734/az34063u-29734572.pdf?src-supplier=Digi-Key; ComponentLink3Description: https://datasheet.ciiva.com/29734/az34063u-29734572.pdf?src-supplier=Digi-Key; Supplier Part Number 1: AZ34063UMTR-G1DICT-ND; LCSC Part Number: C99659; Item Type: IC
footprint SOIC-8
pins: 1 S-COLLECTOR, 2 S-EMITTER, 3 T-CAP, 4 GND, 5 COMP-IN/IP, 6 VCC, 7 IPK SENSE, 8 D-COLLECTOR

## B2B-EH-A(LF)(SN)
designator J?
CONN HEADER VERT 2POS 2.5MM; Manufacturer: JST; Manufacturer Part Number: B2B-EH-A(LF)(SN); Current Rating: 3A; Voltage Rating: 250V; Contact Resistance: 20mR; Number of Positions: 2; Connector Type: Male Pin,Plug; Gender: Male; Item Type: JST Connector; Supplier 1: Digi-Key; Stock 1: 25023; Pricing 1: 1=0.14, 10=0.131, 100=0.0809, 500=0.06698, 1000=0.05861, 5000=0.05024, 10000=0.04884 (USD); Mount: Through Hole; Contact Material: Copper Alloy,Brass; Color: Natural; Contact Plating: Tin,Copper; Housing Color: White; Housing Material: Nylon; Min Operating Temperature: -25°C; Max Operating Temperature: 85°C; Number of Rows: 1; Fastening Type: Detent; Packaging: Bulk; Max Current Rating: 3A; Termination: Press-Fit; Number of Contacts: 2; Max Voltage Rating (AC): 250V; Orientation: Straight; Length: 7.5mm; Pitch: 2.5mm; Contact Mating Length: 0.13inch; Depth: 3.8mm; Lead Free: Lead Free; ComponentLink1URL: http://uk.rs-online.com/webdocs/05aa/0900766b805aab1f.pdf?src-supplier=RSComponents; ComponentLink1Description: http://uk.rs-online.com/webdocs/05aa/0900766b805aab1f.pdf?src-supplier=RSComponents; ComponentLink2URL: http://www.jst-mfg.com/product/pdf/eng/eEH.pdf?src-supplier=Digi-Key; ComponentLink2Description: http://www.jst-mfg.com/product/pdf/eng/eEH.pdf?src-supplier=Digi-Key; ComponentLink3URL: https://www.verical.com/server-webapp/html/getDatasheet?partID=639961&src-supplier=Verical; ComponentLink3Description: https://www.verical.com/server-webapp/html/getDatasheet?partID=639961&src-supplier=Verical; ComponentLink4URL: http://www1.futureelectronics.com/doc/JST/B2B-EH-A(LF)(SN).pdf?src-supplier=Future+Electronics; ComponentLink4Description: http://www1.futureelectronics.com/doc/JST/B2B-EH-A(LF)(SN).pdf?src-supplier=Future+Electronics; ComponentLink5URL: http://www.produktinfo.conrad.com/datenblaetter/1200000-1299999/001217319-da-01-en-STIFTLEISTE_GERADE_2_POL__RM_25MM.pdf?src-supplier=Conrad; ComponentLink5Description: http://www.produktinfo.conrad.com/datenblaetter/1200000-1299999/001217319-da-01-en-STIFTLEISTE_GERADE_2_POL__RM_25MM.pdf?src-supplier=Conrad; Supplier Part Number 1: 455-1611-ND; LCSC Part Number: C160262
footprint B2B-EH-A(LF)(SN).
pins: 1, 2

## B2B-XH-A(LF)(SN)
designator J?
Conn Shrouded Header (4 Sides) HDR 2 POS 2.5mm Solder ST Thru-Hole Box; Manufacturer: JST; Manufacturer Part Number: B2B-XH-A(LF)(SN); Number of Positions: 2; Connector Type: Male Pin; Current Rating: 3A; Contact Resistance: 20mR; Voltage Rating: 250V; Insulation Resistance: 1GR; Wire/Cable Gauge: 22AWG; Item Type: JST Connector; Supplier 1: Farnell; RoHS: Yes; Category: FFC / FPC; Stock 1: 219240; Pricing 1: 100=0.06860, 1000=0.04800, 2500=0.04520, 5000=0.04230, 10000=0.03950, 20000=0.03660 (GBP); Mount: Through Hole; Contact Plating: Tin,Copper,Lead; Color: Natural; Contact Material: Brass; Housing Color: White; Housing Material: Polyamide; Min Operating Temperature: -25°C; Max Operating Temperature: 85°C; Number of Rows: 1; Packaging: Bulk; Termination: Solder; Fastening Type: Detent; Max Current Rating: 3A; Voltage Rating (AC): 250V; Max Voltage Rating (AC): 250V; Number of Contacts: 2; Max Voltage Rating (DC): 250V; Orientation: Straight; Length: 7.4mm; Pitch: 2.5mm; Lead Pitch: 2.5mm; Depth: 5.75mm; REACH SVHC: No SVHC; Lead Free: Lead Free; ComponentLink1URL: https://datasheet.ciiva.com/26894/getdatasheetpartid-640357-26894434.pdf?src-supplier=Verical; ComponentLink1Description: https://datasheet.ciiva.com/26894/getdatasheetpartid-640357-26894434.pdf?src-supplier=Verical; ComponentLink2URL: https://datasheet.ciiva.com/11746/0900766b8082653e-11746979.pdf?src-supplier=RSComponents; ComponentLink2Description: https://datasheet.ciiva.com/11746/0900766b8082653e-11746979.pdf?src-supplier=RSComponents; ComponentLink3URL: https://datasheet.ciiva.com/26894/getdatasheetpartid-385291-26894760.pdf?src-supplier=Verical; ComponentLink3Description: https://datasheet.ciiva.com/26894/getdatasheetpartid-385291-26894760.pdf?src-supplier=Verical; ComponentLink4URL: https://datasheet.ciiva.com/8052/5448-8052024.pdf?src-supplier=Element14; ComponentLink4Description: https://datasheet.ciiva.com/8052/5448-8052024.pdf?src-supplier=Element14; ComponentLink5URL: https://datasheet.ciiva.com/20207/523653-20207167.pdf?src-supplier=Rapid+Electronics; ComponentLink5Description: https://datasheet.ciiva.com/20207/523653-20207167.pdf?src-supplier=Rapid+Electronics; Supplier Part Number 1: 1516276; LCSC Part Number: C158012
footprint B2B-XH-A(LF)(SN)_
pins: 1, 2